# Altium footprint library ACE1V3225201R.PcbLib: 1 footprints
Each footprint in its own frame and in the unit in brackets; x right, y up, seen from the top. Pads: shape width x height; smd on the part's side, far side on the other; paste and mask are expansions set on the pad; w line width, h text height; cw(c..) or ccw(c..) is an arc to the next point about the centre after c.
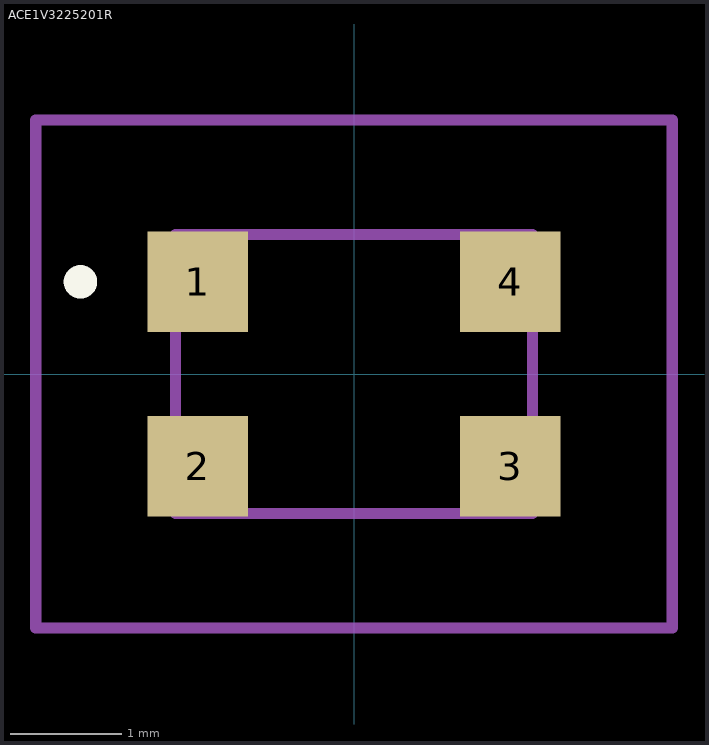
[diagram p0: the footprint, top view; thin cyan lines are the x and y axes]

## ACE1V3225201R [mm]
pads (4):
  rect 0.9x0.9 smd: 1(-1.4,0.825) 2(-1.4,-0.825) 3(1.4,-0.825) 4(1.4,0.825)
Top Overlay:
  lines w0.2: -2.5,0.825 -2.5,0.825 ; -2.5,0.825 ccw(c-2.45,0.825) -2.4,0.825 ; -2.5,0.825 cw(c-2.45,0.825) -2.4,0.825 ; -2.5,0.825 -2.5,0.825 ; -2.5,0.825 ccw(c-2.45,0.825) -2.4,0.825 ; -2.4,0.825 -2.4,0.825
Mechanical 15:
  lines w0.1: -1.6,-1.25 1.6,-1.25 1.6,1.25 -1.6,1.25 -1.6,-1.25
Mechanical 20:
  lines w0.1: -2.85,-2.275 2.85,-2.275 2.85,2.275 -2.85,2.275 -2.85,-2.275